# Altium footprint library Connectors.PcbLib: 113 footprints (part 1 of 8)
Each footprint in its own frame and in the unit in brackets; x right, y up, seen from the top. Pads: shape width x height; smd on the part's side, far side on the other; paste and mask are expansions set on the pad; w line width, h text height; cw(c..) or ccw(c..) is an arc to the next point about the centre after c.
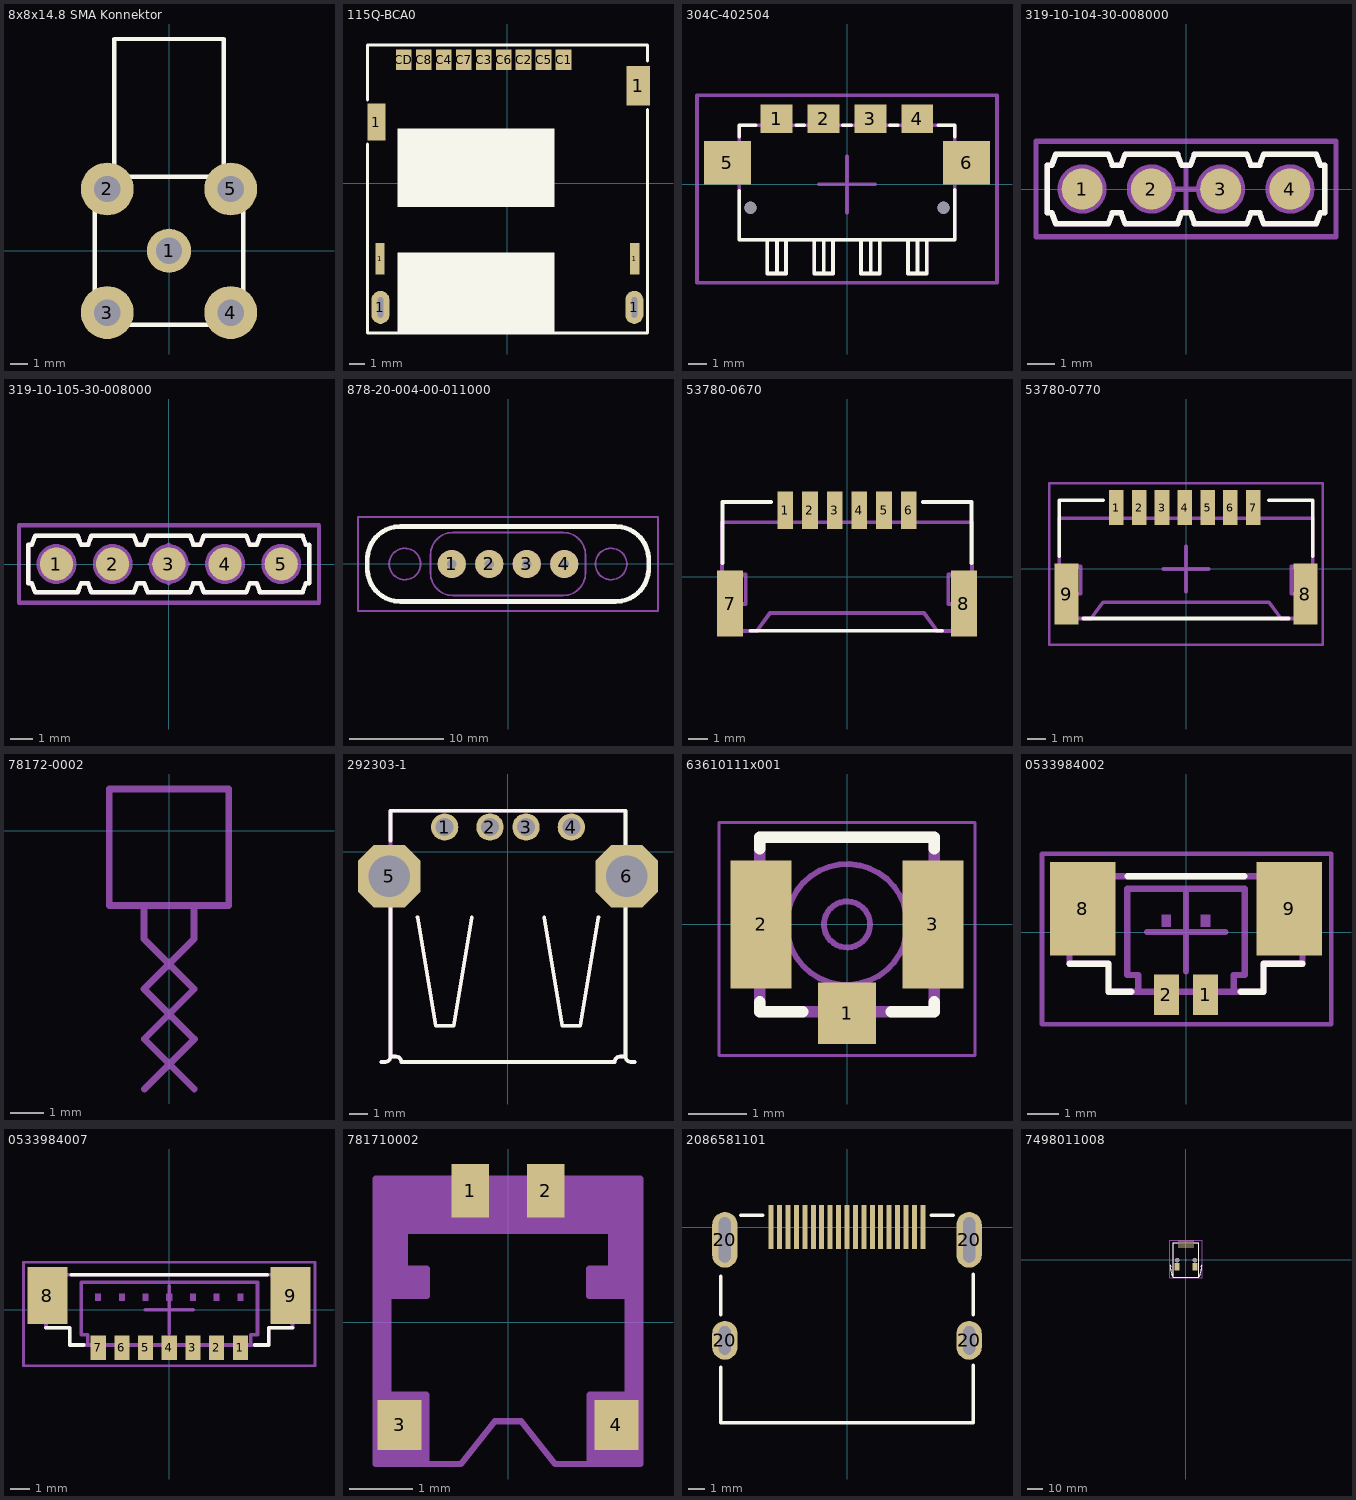
[diagram p0: the footprints below, top view; thin cyan lines are the x and y axes]

## 8x8x14.8 SMA Konnektor [mm]
pads (5):
  round 2.5 / inner round 2.032 / far side round 2.032 hole 1.5 mask+0: 1(0,0)
  round 3 / inner round 2.134 / far side round 2.134 hole 1.5 mask+0: 2(-3.5,3.5) 3(-3.5,-3.5) 4(3.5,-3.5) 5(3.5,3.5)
Top Overlay:
  lines w0.254: -3.1,4.2 -3.1,12 3.1,12 3.1,4.2 ; -4.2,-4.2 4.2,-4.2 4.2,4.2 -4.2,4.2 -4.2,-4.2
3D body: height 0.25, standoff 0, extent 0,0 0.254,0.254
3D body "SMA-angled.STEP": height 9.91, standoff -3.89, extent -3.5,-3.5 3.5,11

## 115Q-BCA0 [mm]
pads (15):
  rect 1.15x2.35 smd: 1(-8.325,3.905)
  rect 0.6x2 smd: 1(-8.1,-4.775) 1(8.1,-4.775)
  oval 1.15x2.1 hole 0.35 slot 1.3 at 90 deg: 1(-8.07,-7.875) 1(8.07,-7.875)
  rect 1.5x2.5 smd: 1(8.325,6.225)
  rect 1x1.3 smd: C1(3.57,7.875) C2(1.03,7.875) C3(-1.51,7.875) C4(-4.05,7.875) C5(2.3,7.875) C6(-0.24,7.875) C7(-2.78,7.875) C8(-5.32,7.875) CD(-6.59,7.875)
Top Overlay:
  rectangle: -7,-9.4 3,-4.4
  rectangle: -7,-1.5 3,3.5
  lines w0.2: -8.9,2.5 -8.9,-9.5 -8.7,-9.5 8.9,-9.5 8.9,4.7 ; -8.9,5.3 -8.9,8.8 -8.8,8.8 8.9,8.8 8.9,7.8
3D body "115Q-BCA0_C_4.stp": height 1.66, standoff -0.67, extent -8.645,-9.425 8.645,8.65

## 304C-402504 [mm]
pads (8):
  rect 1.7x1.5 smd: 1(-3.75,3.5) 2(-1.25,3.5) 3(1.25,3.5) 4(3.75,3.5)
  rect 2.5x2.3 smd: 5(-6.375,1.15) 6(6.375,1.15)
  round 0.65 hole 0.65 unplated: hole(-5.15,-1.25) hole(5.15,-1.25)
Top Overlay:
  lines w0.2: -5.75,-0.354 -5.75,-2.95 0,-2.95 5.75,-2.95 5.75,-0.295 ; -5.75,2.548 -5.75,3.15 -4.878,3.15 ; -4.25,-2.95 -4.25,-4.752 -3.25,-4.752 -3.25,-2.95 ; -3.738,-4.752 -3.738,-2.95 ; -2.708,3.15 -2.293,3.15 ; -1.75,-2.95 -1.75,-4.752 -0.75,-4.752 -0.75,-2.95 ; -1.238,-4.752 -1.238,-2.95 ; -0.208,3.15 0.207,3.15 ; 0.75,-2.95 0.75,-4.752 1.75,-4.752 1.75,-2.95 ; 1.262,-4.752 1.262,-2.95 ; 2.292,3.15 2.707,3.15 ; 3.25,-2.95 3.25,-4.752 4.25,-4.752 4.25,-2.95 ; 3.762,-4.752 3.762,-2.95 ; 4.878,3.15 5.75,3.15 5.75,2.548
Top Assembly:
  rectangle: -4.1,3.15 -3.401,4.15
  rectangle: -1.6,3.15 -0.901,4.15
  rectangle: 0.9,3.15 1.599,4.15
  rectangle: 3.4,3.15 4.099,4.15
  region: 6.45,2.15 5.75,2.15 5.75,0.15 6.45,0.15
  region: 6.856,2.136 6.339,2.136 6.339,1.547 6.856,1.547
  region: 6.856,0.753 6.339,0.753 6.339,0.164 6.856,0.164
  rectangle: 6.336,0.728 6.658,0.855
  rectangle: 6.385,0.746 6.519,0.959
  rectangle: 6.27,1.515 6.301,1.539
  rectangle: 6.301,1.38 6.439,1.515
  rectangle: 6.448,1.416 6.598,1.598
  rectangle: 6.449,1.504 6.683,1.584
  rectangle: 6.347,1.311 6.501,1.487
  rectangle: 6.195,1.455 6.545,1.878
  rectangle: -6.45,0.15 -5.75,2.15
  rectangle: -6.856,1.547 -6.339,2.136
  rectangle: -6.856,0.164 -6.339,0.753
  region: -6.336,0.855 -6.658,0.855 -6.658,0.728 -6.336,0.728
  region: -6.385,0.959 -6.519,0.959 -6.519,0.746 -6.385,0.746
  region: -6.27,1.539 -6.301,1.539 -6.301,1.515 -6.27,1.515
  region: -6.301,1.515 -6.439,1.515 -6.439,1.38 -6.301,1.38
  region: -6.448,1.598 -6.598,1.598 -6.598,1.416 -6.448,1.416
  region: -6.449,1.584 -6.683,1.584 -6.683,1.504 -6.449,1.504
  region: -6.347,1.487 -6.501,1.487 -6.501,1.311 -6.347,1.311
  region: -6.195,1.878 -6.545,1.878 -6.545,1.455 -6.195,1.455
  lines w0.1: -3.75,-4.752 -3.738,-4.752 -3.738,-2.95 ; -1.25,-4.752 -1.25,-2.95 ; 1.25,-4.752 1.25,-2.95 ; 3.75,-4.752 3.75,-2.95 ; 5.75,0.15 6.85,0.15 6.85,0.75 cw(c6.85,1.15) 6.45,1.15 cw(c6.85,1.15) 6.85,1.55 6.85,2.15 6.375,2.15 5.75,2.15 ; -6.85,0.15 -6.85,0.75 ccw(c-6.85,1.15) -6.45,1.15 ccw(c-6.85,1.15) -6.85,1.55 -6.85,2.15 -6.375,2.15 -5.75,2.15 -5.75,0.15 -6.85,0.15
  lines w0.2: -4.25,-2.95 -4.25,-4.752 -3.25,-4.752 -3.25,-2.95 ; -1.75,-2.95 -1.75,-4.752 -0.75,-4.752 -0.75,-2.95 ; 0.75,-2.95 0.75,-4.752 1.75,-4.752 1.75,-2.95 ; 3.25,-2.95 3.25,-4.752 4.25,-4.752 4.25,-2.95 ; -5.75,-2.95 -5.75,3.15 5.75,3.15 5.75,-2.95 -5.75,-2.95
  text ".Designator" at -7.618,-0.508 h1.52
Mechanical 15:
  lines w0.2: -1.5,0 1.5,0 ; 0,-1.5 0,1.5 ; -8,-5.25 8,-5.25 8,4.75 -8,4.75 -8,-5.25
3D body "304C-402504_C_1 v1.step": height 4, standoff -0.5, extent -6.85,-4.801 6.85,4.15

## 319-10-104-30-008000 [mm] "Pogo Target"
pads (4):
  round 1.5 smd: 1(-3.81,0) 2(-1.27,0) 3(1.27,0) 4(3.81,0)
Top Overlay:
  lines w0.2: 4.774,-1.27 2.845,-1.27 2.7,-0.87 2.38,-0.87 2.234,-1.27 0.305,-1.27 0.16,-0.87 -0.16,-0.87 -0.306,-1.27 -2.235,-1.27 -2.38,-0.87 -2.7,-0.87 -2.846,-1.27 -4.775,-1.27 -4.92,-0.87 -5.08,-0.87 -5.08,0.87 -4.92,0.87 -4.775,1.27 -2.846,1.27 -2.7,0.87 -2.38,0.87 -2.235,1.27 -0.306,1.27 -0.16,0.87 0.16,0.87 0.305,1.27 2.234,1.27 2.38,0.87 2.7,0.87 2.845,1.27 4.774,1.27 ; 4.774,-1.27 4.92,-0.87 ; 4.774,-1.27 4.92,-0.87 ; 4.774,1.27 4.92,0.87 ; 4.774,1.27 4.92,0.87 ; 4.92,-0.87 5.08,-0.87 5.08,0.87 4.92,0.87
Top Assembly:
  circle w1: c-3.81,0 r0.398
  circle w1: c-1.27,0 r0.398
  circle w1: c1.27,0 r0.398
  circle w1: c3.81,0 r0.398
  lines w0.2: 4.774,-1.27 2.845,-1.27 2.7,-0.87 2.38,-0.87 2.234,-1.27 0.305,-1.27 0.16,-0.87 -0.16,-0.87 -0.306,-1.27 -2.235,-1.27 -2.38,-0.87 -2.7,-0.87 -2.846,-1.27 -4.775,-1.27 -4.92,-0.87 -5.08,-0.87 -5.08,0.87 -4.92,0.87 -4.775,1.27 -2.846,1.27 -2.7,0.87 -2.38,0.87 -2.235,1.27 -0.306,1.27 -0.16,0.87 0.16,0.87 0.305,1.27 2.234,1.27 2.38,0.87 2.7,0.87 2.845,1.27 4.774,1.27 ; 4.774,-1.27 4.92,-0.87 ; 4.774,-1.27 4.92,-0.87 ; 4.774,1.27 4.92,0.87 ; 4.774,1.27 4.92,0.87 ; 4.92,-0.87 5.08,-0.87 5.08,0.87 4.92,0.87
  text ".Designator" at -7.618,2.242 h1.52
Mechanical 15:
  lines w0.2: -0.876,-0.017 0.864,-0.017 ; 0,-0.87 0,0.87 ; 0,0.87 0,0.87 ; -5.5,-1.75 5.5,-1.75 5.5,1.75 -5.5,1.75 -5.5,-1.75
3D body "mill-max-319-10-104-30-008000 v1.step": height 4.29, standoff 0, extent -5.08,-1.27 5.08,1.27

## 319-10-105-30-008000 [mm] "Pogo Target"
pads (5):
  round 1.5 smd: 1(-5.08,0) 2(-2.54,0) 3(0,0) 4(2.54,0) 5(5.08,0)
Top Overlay:
  lines w0.2: 3.505,-1.27 3.65,-0.87 ; 3.505,1.27 3.65,0.87 ; 6.044,-1.27 4.116,-1.27 3.97,-0.87 3.65,-0.87 ; 6.044,1.27 4.116,1.27 3.97,0.87 3.65,0.87 ; 6.045,-1.27 6.19,-0.87 6.35,-0.87 6.35,0.87 ; 6.045,1.27 6.19,0.87 ; 3.65,-0.87 3.504,-1.27 1.576,-1.27 1.43,-0.87 1.11,-0.87 0.964,-1.27 -0.964,-1.27 -1.11,-0.87 -1.43,-0.87 -1.576,-1.27 -3.504,-1.27 -3.65,-0.87 -3.97,-0.87 -4.116,-1.27 -6.044,-1.27 -6.19,-0.87 -6.35,-0.87 -6.35,0.87 -6.19,0.87 -6.044,1.27 -4.116,1.27 -3.97,0.87 -3.65,0.87 -3.504,1.27 -1.576,1.27 -1.43,0.87 -1.11,0.87 -0.964,1.27 0.964,1.27 1.11,0.87 1.43,0.87 1.576,1.27 3.504,1.27 3.65,0.87
Top Assembly:
  circle w1: c5.08,0 r0.398
  circle w1: c-5.08,0 r0.398
  circle w1: c-2.54,0 r0.398
  circle w1: c0,0 r0.398
  circle w1: c2.54,0 r0.398
  lines w0.2: 3.505,-1.27 3.65,-0.87 ; 3.505,1.27 3.65,0.87 ; 6.045,-1.27 6.19,-0.87 ; 6.045,1.27 6.19,0.87 ; 3.65,-0.87 3.97,-0.87 4.116,-1.27 6.044,-1.27 6.19,-0.87 ; 3.65,-0.87 3.504,-1.27 1.576,-1.27 1.43,-0.87 1.11,-0.87 0.964,-1.27 -0.964,-1.27 -1.11,-0.87 -1.43,-0.87 -1.576,-1.27 -3.504,-1.27 -3.65,-0.87 -3.97,-0.87 -4.116,-1.27 -6.044,-1.27 -6.19,-0.87 -6.35,-0.87 -6.35,0.87 -6.19,0.87 -6.044,1.27 -4.116,1.27 -3.97,0.87 -3.65,0.87 -3.504,1.27 -1.576,1.27 -1.43,0.87 -1.11,0.87 -0.964,1.27 0.964,1.27 1.11,0.87 1.43,0.87 1.576,1.27 3.504,1.27 3.65,0.87 ; 3.65,0.87 3.97,0.87 4.116,1.27 6.044,1.27 6.19,0.87 ; 6.19,-0.87 6.35,-0.87 6.35,0.87 6.19,0.87
  text ".Designator" at -7.618,2.032 h1.52
Mechanical 15:
  lines w0.2: -0.868,0 0.872,0 ; 0,-0.87 0,0.87 ; -6.77,-1.75 6.784,-1.75 6.784,1.75 -6.77,1.75 -6.77,-1.75
3D body "mill-max-319-10-105-30-008000.STEP": height 4.29, standoff 0, extent -6.35,-1.27 6.35,1.27

## 878-20-004-00-011000 [mm]
pads (4):
  round 3 hole 1 unplated: 1(-6,0) 2(-2,0) 3(2,0) 4(6,0)
Top Overlay:
  lines w0.5: -15,-0.495 ccw(c-11.495,-0.495) -11.495,-4 11.495,-4 ccw(c11.495,-0.495) 15,-0.495 15,0.495 ccw(c11.495,0.495) 11.495,4.001 -11.495,4.001 ccw(c-11.495,0.495) -15,0.495 -15,-0.495
Top Assembly:
  circle w0.2: c-11,0 r1.677
  circle w0.2: c11,0 r1.677
  circle w2: c-6,0 r0.5
  circle w2: c-2,0 r0.5
  circle w2: c2,0 r0.5
  circle w2: c6,0 r0.5
  lines w0.2: -15,-0.495 ccw(c-11.495,-0.495) -11.495,-4 11.495,-4 ccw(c11.495,-0.495) 15,-0.495 15,0.495 ccw(c11.495,0.495) 11.495,4.001 -11.495,4.001 ccw(c-11.495,0.495) -15,0.495 -15,-0.495 ; -8.256,-0.991 ccw(c-5.893,-0.991) -5.893,-3.353 5.893,-3.353 ccw(c5.893,-0.991) 8.256,-0.991 8.256,0.991 ccw(c5.893,0.991) 5.893,3.353 -5.893,3.353 ccw(c-5.893,0.991) -8.256,0.991 -8.256,-0.991
  text ".Designator" at -4.998,-2.833 h1
Mechanical 15:
  lines w0.2: -16,-5 -16,5 16,5 16,-5 -16,-5
3D body "mill-max-878-20-004-00-011000.STEP": height 7.63, standoff -7.99, extent -15,-4 15,4.001

## 53780-0670 [mm]
pads (8):
  rect 0.8x1.9 smd: 1(-3.125,3.37) 2(-1.875,3.37) 3(-0.625,3.37) 4(0.625,3.37) 5(1.875,3.37) 6(3.125,3.37)
  rect 1.3x3.35 smd: 7(-5.925,-1.375) 8(5.925,-1.375)
Top Overlay:
  lines w0.2: -6.31,0.688 -6.31,3.766 -3.851,3.766 ; -4.892,-2.748 4.827,-2.748 ; 3.851,3.766 6.31,3.766 6.31,0.688
Top Assembly:
  rectangle: 2.825,2.7 3.425,3.8
  rectangle: 1.575,2.7 2.175,3.8
  rectangle: 0.325,2.7 0.925,3.8
  rectangle: -0.925,2.7 -0.325,3.8
  rectangle: -2.175,2.7 -1.575,3.8
  rectangle: -3.425,2.7 -2.825,3.8
  lines w0.2: -6.325,0.1 -6.325,2.75 6.325,2.75 6.325,0.1 5.13,0.1 5.13,-1.4 5.43,-1.4 5.43,-2.75 4.565,-2.75 3.91,-1.85 -3.91,-1.85 -4.565,-2.75 -5.28,-2.75 -5.43,-2.75 -5.43,-1.4 -5.13,-1.4 -5.13,0.1 -6.325,0.1
3D body "537800670.stp": height 1.91, standoff 0.01, extent -6.325,-2.75 6.325,3.75
3D body "511460600.stp": height 1.9, standoff 0.1, extent -5.36,-3.8 5.36,2.4

## 53780-0770 [mm]
pads (9):
  rect 0.8x1.9 smd: 1(-3.815,3.37) 2(-2.565,3.37) 3(-1.315,3.37) 4(-0.065,3.37) 5(1.185,3.37) 6(2.435,3.37) 7(3.686,3.37)
  rect 1.3x3.35 smd: 8(6.55,-1.375) 9(-6.55,-1.375)
Top Overlay:
  lines w0.2: -6.957,0.688 -6.957,3.767 -4.542,3.767 ; -5.629,-2.716 0,-2.716 5.629,-2.716 ; 4.542,3.767 6.957,3.767 6.957,0.688
Top Assembly:
  rectangle: -4.115,2.7 -3.515,3.8
  rectangle: -2.865,2.7 -2.265,3.8
  rectangle: -1.615,2.7 -1.015,3.8
  rectangle: -0.365,2.7 0.235,3.8
  rectangle: 0.885,2.7 1.485,3.8
  rectangle: 2.135,2.7 2.735,3.8
  rectangle: 3.385,2.7 3.985,3.8
  lines w0.2: -6.957,0.134 -6.957,2.784 0,2.784 6.957,2.784 6.957,0.134 5.762,0.134 5.762,-1.366 6.062,-1.366 6.062,-2.716 5.197,-2.716 4.542,-1.816 0,-1.816 -4.542,-1.816 -5.197,-2.716 -6.062,-2.716 -6.062,-1.366 -5.762,-1.366 -5.762,0.134 -6.957,0.134
  text ".Designator" at -7.618,-0.508 h1.52
Mechanical 15:
  lines w0.152: -7.5,-4.159 -7.5,4.704 7.5,4.704 7.5,-4.159 -7.5,-4.159
  lines w0.2: -1.25,0 1.25,0 ; -0.002,-1.25 -0.002,1.25
3D body "511460700.step": height 1.81, standoff 0.01, extent -5.985,-3.875 5.985,2.325
3D body "537800770.stp": height 1.91, standoff 0.01, extent -6.95,-2.75 6.95,3.75

## 78172-0002 [mm]
Top Assembly:
  lines w0.2: -0.748,-2.23 -0.748,-3.23 0.742,-4.72 ; -0.731,-7.699 0.759,-6.21 ; 0.748,-6.21 -0.742,-4.72 0.748,-3.23 0.748,-2.23 ; 0.753,-7.699 -0.736,-6.21 0.753,-4.72 ; -1.78,-2.23 1.78,-2.23 1.78,1.24 -1.78,1.24 -1.78,-2.23
3D body "781720002.stp": height 1.52, standoff 0.22, extent -1.78,-2.23 1.78,1.24

## 292303-1 [mm]
pads (6):
  round 1.508 / inner round 1.524 / far side round 1.508 hole 1: 1(-3.5,1.355) 2(-1,1.355) 3(1,1.355) 4(3.5,1.355)
  oct 3.45x3.45 / inner oct 1.524x1.524 / far side oct 3.45x3.45 hole 2.3: 5(-6.57,-1.355) 6(6.57,-1.355)
Top Overlay:
  lines w0.203: -7,-11.635 -6.8,-11.635 ccw(c-6.8,-11.335) -6.5,-11.335 ; -6.5,-2.635 -6.5,-11.335 ; -6.5,0.605 -6.5,2.265 6.5,2.265 6.5,-0.135 ; -5,-3.635 -4,-9.635 -3,-9.635 -2,-3.635 ; 2,-3.635 3,-9.635 4,-9.635 5,-3.635 ; 6.5,-2.635 6.5,-11.335 ; 7,-11.635 6.8,-11.635 cw(c6.8,-11.335) 6.5,-11.335 ; -6.5,-11.335 -6.5,-11.335 ; -6.5,-11.335 -6.2,-11.335 cw(c-6.2,-11.635) -5.9,-11.635 5.9,-11.635 cw(c6.2,-11.635) 6.2,-11.335 6.5,-11.335
Top Assembly:
  lines w0.203: -7,-11.635 -6.8,-11.635 ccw(c-6.8,-11.335) -6.5,-11.335 ; -5,-3.635 -4,-9.635 -3,-9.635 -2,-3.635 ; 2,-3.635 3,-9.635 4,-9.635 5,-3.635 ; 7,-11.635 6.8,-11.635 cw(c6.8,-11.335) 6.5,-11.335 ; -6.5,-11.335 -6.5,-11.335 ; -6.5,-11.335 -6.2,-11.335 cw(c-6.2,-11.635) -5.9,-11.635 5.9,-11.635 cw(c6.2,-11.635) 6.2,-11.335 6.5,-11.335 ; -6.5,-11.335 -6.5,-2.635 -6.5,2.265 6.5,2.265 6.5,-2.635 6.5,-11.335
  text ".Designator" at -7.498,-0.5 h1.5
3D body "TypeA.stp": height 7.77, standoff -3.6, extent -8.116,-11.745 8.117,2.255

## 63610111x001 [mm] "RF CONNECTOR VERTICAL 1.25MM"
height 1.25
pads (3):
  rect 1x1.05 smd: 1(0,-1.525)
  rect 1.05x2.2 smd: 2(-1.475,0) 3(1.475,0)
Top Overlay:
  lines w0.2: -1.5,-1.331 -1.5,-1.5 -0.76,-1.5 ; -1.5,1.3 -1.5,1.5 1.5,1.5 1.5,1.3 ; 0.76,-1.5 1.5,-1.5 1.5,-1.331
Top Assembly:
  circle w0.1: c0,0 r1.037
  circle w0.1: c0,0 r0.396
  rectangle: -1.75,-1 -1.5,1
  rectangle: -0.5,-1.72 0.5,-1.5
  region: 1.75,1 1.5,1 1.5,-1 1.75,-1
  lines w0.2: 1.251,1.5 -1.128,1.5 ; -1.128,1.5 -1.5,1.5 -1.5,1.1 -1.5,-1.162 -1.5,-1.5 -1.128,-1.5 1.251,-1.5 1.5,-1.5 1.5,-1.162 1.5,1.1 1.5,1.5 -1.128,1.5
  text ".Designator" at -3.432,1.924 h0.7
Mechanical 15:
  lines w0.05: -2.2,-2.25 -2.2,1.751 2.2,1.751 2.2,-2.25 -2.2,-2.25
3D body "63610111x001.stp": height 1.25, standoff 0, extent -1.5,-1.55 1.5,1.551

## 0533984002 [mm]
pads (4):
  rect 0.8x1.3 smd: 1(0.625,-2) 2(-0.625,-2)
  rect 2.1x3 smd: 8(-3.3,0.75) 9(3.3,0.75)
Top Overlay:
  lines w0.2: -3.729,-1.012 -2.479,-1.012 -2.479,-1.912 -1.752,-1.912 ; -1.866,1.789 0,1.789 1.864,1.789 ; 1.749,-1.911 2.477,-1.911 2.477,-1.011 3.727,-1.011
Top Assembly:
  rectangle: -0.805,-2.312 -0.486,-1.912
  rectangle: 0.445,-2.312 0.764,-1.912
  rectangle: -0.791,0.167 -0.472,0.567
  rectangle: 0.459,0.167 0.778,0.567
  lines w0.2: -1.529,-1.912 -1.529,-1.375 -1.879,-1.375 -1.879,1.389 0,1.389 ; -0.004,-1.912 -2.479,-1.912 -2.479,-1.012 -3.729,-1.012 -3.729,1.788 -0.002,1.788 ; -0.002,1.389 1.877,1.389 1.877,-1.374 1.527,-1.374 1.527,-1.911 ; 0,1.789 3.727,1.789 3.727,-1.011 2.477,-1.011 2.477,-1.911 0.002,-1.911
  text ".Designator" at -3.501,-1.064 h0.7
Mechanical 15:
  lines w0.152: -4.607,-2.949 4.651,-2.949 4.651,2.509 -4.607,2.509 -4.607,-2.949
  lines w0.2: -1.24,0.004 1.26,0.004 ; -0.002,-1.25 -0.002,1.25
3D body "533984002 v2.step": height 4.7, standoff -0.02, extent -3.827,-2.35 3.823,1.85

## 0533984007 [mm]
pads (9):
  rect 0.8x1.3 smd: 1(3.75,-2) 2(2.5,-2) 3(1.25,-2) 4(0,-2) 5(-1.25,-2) 6(-2.5,-2) 7(-3.75,-2)
  rect 2.1x3 smd: 8(-6.43,0.75) 9(6.4,0.75)
Top Overlay:
  lines w0.2: -6.5,-0.95 -5.25,-0.95 -5.25,-1.85 -4.522,-1.85 ; -5.168,1.85 0,1.85 5.168,1.85 ; 4.522,-1.85 5.25,-1.85 5.25,-0.95 6.5,-0.95
Top Assembly:
  rectangle: -4.105,-2.4 -3.405,-1.85
  rectangle: -2.855,-2.4 -2.155,-1.85
  rectangle: -1.605,-2.4 -0.905,-1.85
  rectangle: -0.355,-2.4 0.345,-1.85
  rectangle: 0.895,-2.4 1.595,-1.85
  rectangle: 2.145,-2.4 2.845,-1.85
  rectangle: 3.395,-2.4 4.095,-1.85
  rectangle: -3.91,0.475 -3.591,0.875
  rectangle: -2.66,0.475 -2.341,0.875
  rectangle: -1.41,0.475 -1.091,0.875
  rectangle: -0.16,0.475 0.159,0.875
  rectangle: 1.09,0.475 1.409,0.875
  rectangle: 2.34,0.475 2.659,0.875
  rectangle: 3.59,0.475 3.909,0.875
  lines w0.2: 4.3,-1.85 4.3,-1.313 4.65,-1.313 4.65,1.45 0,1.45 -4.65,1.45 -4.65,-1.313 -4.3,-1.313 -4.3,-1.85 ; -4.301,-1.85 -4.3,-1.85 ; -6.5,-0.95 -6.5,1.85 0,1.85 6.5,1.85 6.5,-0.95 5.25,-0.95 5.25,-1.85 0,-1.85 -5.25,-1.85 -5.25,-0.95 -6.5,-0.95
  text ".Designator" at -5.001,-0.731 h1
Mechanical 15:
  lines w0.152: -7.701,-2.949 7.699,-2.949 7.699,2.509 -7.701,2.509 -7.701,-2.949
  lines w0.2: -1.25,0 1.25,0 ; -0.002,-1.25 -0.002,1.25
3D body "533984007 v3.step": height 4.7, standoff -0.02, extent -6.95,-2.35 6.95,1.85

## 781710002 [mm]
pads (4):
  rect 0.6x0.85 smd: 1(-0.6,2.09) 2(0.6,2.09)
  rect 0.7x0.8 smd: 3(-1.72,-1.63) 4(1.72,-1.63)
Top Assembly:
  rectangle: -2.1,1.418 2.1,2.28
  rectangle: 1.595,0.42 2.1,1.862
  rectangle: 1.29,0.422 2.1,0.85
  rectangle: 1.885,-2.25 2.1,0.632
  rectangle: 1.3,-2.25 2.1,-1.15
  rectangle: -2.1,-2.25 -1.3,-1.134
  rectangle: -2.1,-2.25 -1.854,1.563
  rectangle: -2.1,0.42 -1.29,0.89
  rectangle: -2.1,0.42 -1.595,1.892
  lines w0.1: -1.3,-2.25 -1.3,-1.15 -1.9,-1.15 -1.9,0.42 -1.29,0.42 -1.29,0.85 -1.64,0.85 -1.64,1.45 1.29,1.45 1.64,1.45 1.64,0.85 1.29,0.85 1.29,0.42 1.9,0.42 1.9,-1.15 1.3,-1.15 1.3,-2.25 ; 2.1,-2.25 1.3,-2.25 ; 2.1,-2.25 2.1,2.28 -2.1,2.28 -2.1,-2.25 -0.75,-2.25 -0.21,-1.57 0.21,-1.57 0.75,-2.25 1.3,-2.25
3D body "781710002.stp": height 1.41, standoff -0.04, extent -2.1,-2.25 2.1,2.28

## 2086581101 [mm]
pads (23):
  rect 0.3x2.6 smd: 1(4.5,0) 2(4,0) 3(3.5,0) 4(3,0) 5(2.5,0) 6(2,0) 7(1.5,0) 8(1,0) 9(0.5,0) 10(0,0) 11(-0.5,0) 12(-1,0) 13(-1.5,0) 14(-2,0) 15(-2.5,0) 16(-3,0) 17(-3.5,0) 18(-4,0) 19(-4.5,0)
  oval 1.5x2.3 hole 1.7 slot 0.7 at 0 deg: 20(-7.25,-6.72) 20(7.25,-6.72)
  oval 1.5x3.3 hole 2.7 slot 0.7 at 0 deg: 20(-7.25,-0.76) 20(7.25,-0.76)
Top Overlay:
  lines w0.2: -7.5,-8.3 -7.5,-11.61 7.25,-11.61 7.5,-11.61 7.5,-8.2 ; -7.5,-5.2 -7.5,-2.9 ; -6.3,0.7 -5,0.7 ; 5,0.7 6.3,0.7 ; 7.5,-5.2 7.5,-2.8
3D body "2086581101.stp": height 6.19, standoff -1.86, extent -7.499,-11.697 7.501,0.714

## 7498011008 [mm] "LAN Transformer, body 21.95x16.26mm"
height 13.6
pads (12):
  rect 0.76x5 smd: 1(-4.445,10.125) 2(-3.175,10.125) 3(-1.905,10.125) 4(-0.635,10.125) 5(0.635,10.125) 6(1.905,10.125) 7(3.175,10.125) 8(4.445,10.125)
  round 2.9 hole 2.9 unplated: MH1(-5.715,-0.075) MH2(5.715,-0.075)
  rect 3.42x4.58 smd: Shell(-5.79,-4.315) Shell(5.79,-4.315)
Top Overlay:
  lines w0.2: -10.12,-3.265 cw(c-10.63,-3.775) -9.916,-3.876 ccw(c2.77,-5.175) -9.899,-6.628 ccw(c4.334,-3.766) -9.039,-9.417 cw(c-49.045,-34.875) -8.441,-10.383 cw(c-9.628,-11.274) -8.23,-10.775 ; -5.13,11.075 -8.23,11.075 -8.23,-11.075 8.23,-11.075 8.23,11.075 5.13,11.075 ; 8.23,-10.775 cw(c9.628,-11.274) 8.441,-10.383 cw(c49.045,-34.875) 9.039,-9.417 ccw(c-4.334,-3.766) 9.899,-6.628 ccw(c-2.77,-5.175) 9.916,-3.876 cw(c10.63,-3.775) 10.12,-3.265
Top Assembly:
  rectangle: 4.065,11.065 4.825,11.617
  rectangle: 2.795,11.065 3.555,11.617
  rectangle: 1.525,11.065 2.285,11.617
  rectangle: 0.255,11.065 1.015,11.617
  rectangle: -1.015,11.065 -0.255,11.617
  rectangle: -2.285,11.065 -1.525,11.617
  rectangle: -3.555,11.065 -2.795,11.617
  rectangle: -4.825,11.065 -4.065,11.617
  lines w0.2: -10.119,-3.265 cw(c-10.629,-3.775) -9.915,-3.876 ccw(c2.771,-5.175) -9.899,-6.628 ccw(c4.334,-3.766) -9.038,-9.417 cw(c-49.044,-34.875) -8.44,-10.383 cw(c-9.628,-11.274) -8.229,-10.775 ; 8.231,-10.775 cw(c9.629,-11.274) 8.441,-10.383 cw(c49.046,-34.875) 9.04,-9.417 ccw(c-4.333,-3.766) 9.9,-6.628 ccw(c-2.769,-5.175) 9.917,-3.876 cw(c10.631,-3.775) 10.121,-3.265 ; -8.229,-11.075 -8.229,11.075 8.231,11.075 8.231,-11.075 -8.229,-11.075
  text ".Designator" at -7.498,-0.5 h1.5
Mechanical 15:
  lines w0.05: -0.5,0 0.5,0 ; 0,-0.5 0,0.5 ; -10.32,-11.275 -10.32,12.825 10.32,12.825 10.32,-11.275 -10.32,-11.275
3D body "7498011008.stp": height 15.62, standoff -0.73, extent -10.13,-10.975 10.13,11.617